# Altium footprint library LimeMicroAltiumLib.PcbLib: 876 footprints (part 24 of 57)
Each footprint in its own frame and in the unit in brackets; x right, y up, seen from the top. Pads: shape width x height; smd on the part's side, far side on the other; paste and mask are expansions set on the pad; w line width, h text height; cw(c..) or ccw(c..) is an arc to the next point about the centre after c.
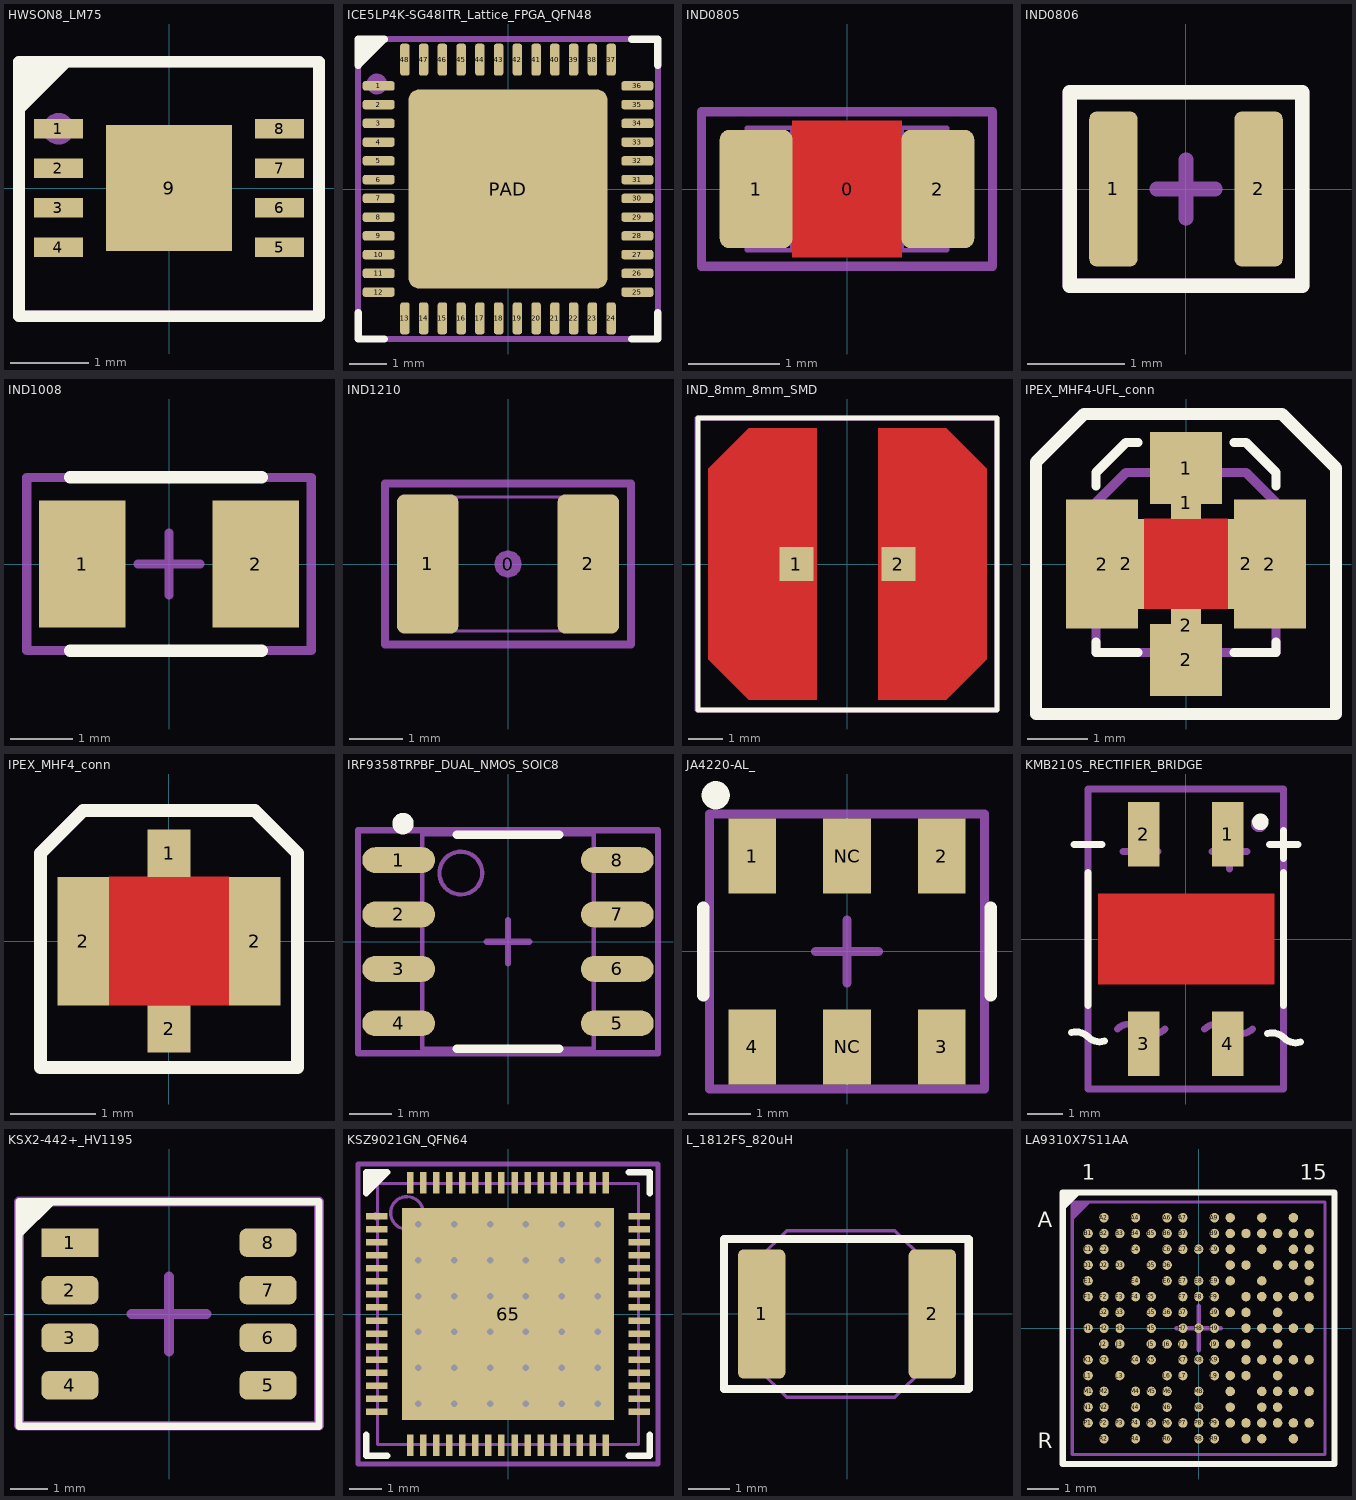
[diagram p23: the footprints below, top view; thin cyan lines are the x and y axes]

## HWSON8_LM75 [mm]
pads (9):
  rect 0.625x0.25 smd mask+0.05: 1(-1.4,0.75) 2(-1.4,0.25) 3(-1.4,-0.25) 4(-1.4,-0.75) 5(1.4,-0.75) 6(1.4,-0.25) 7(1.4,0.25) 8(1.4,0.75)
  rect 1.6x1.6 smd mask+0.05: 9(0,0)
Top Overlay:
  region: -1.9,1.075 -1.9,1.6 -1.375,1.6
  lines w0.15: -1.875,1.025 -1.325,1.575 ; -1.9,-1.625 -1.9,1.6 1.9,1.6 1.9,-1.625 -1.9,-1.625
Mechanical 15:
  circle w0.2: c-1.4,0.75 r0.1
  lines w0.15: -0.3,0 0.3,0 ; 0,-0.3 0,0.3 ; -1.9,-1.625 -1.9,1.6 1.9,1.6 1.9,-1.625 -1.9,-1.625
  text ".Designator" at 0,0 h0.55
3D body "User Library-DFN-8.step": height 0.8, standoff 0, extent -1.51,-1.5 1.51,1.5

## ICE5LP4K-SG48ITR_Lattice_FPGA_QFN48 [mm]
pads (49):
  rrect50% 0.85x0.25 smd mask+0.05: 1(-3.45,2.75) 2(-3.45,2.25) 3(-3.45,1.75) 4(-3.45,1.25) 5(-3.45,0.75) 6(-3.45,0.25) 7(-3.45,-0.25) 8(-3.45,-0.75) 9(-3.45,-1.25) 10(-3.45,-1.75) 11(-3.45,-2.25) 12(-3.45,-2.75) 25(3.45,-2.75) 26(3.45,-2.25) 27(3.45,-1.75) 28(3.45,-1.25) 29(3.45,-0.75) 30(3.45,-0.25) 31(3.45,0.25) 32(3.45,0.75) 33(3.45,1.25) 34(3.45,1.75) 35(3.45,2.25) 36(3.45,2.75)
  rrect50% 0.25x0.85 smd mask+0.05: 13(-2.75,-3.45) 14(-2.25,-3.45) 15(-1.75,-3.45) 16(-1.25,-3.45) 17(-0.75,-3.45) 18(-0.25,-3.45) 19(0.25,-3.45) 20(0.75,-3.45) 21(1.25,-3.45) 22(1.75,-3.45) 23(2.25,-3.45) 24(2.75,-3.45) 37(2.75,3.45) 38(2.25,3.45) 39(1.75,3.45) 40(1.25,3.45) 41(0.75,3.45) 42(0.25,3.45) 43(-0.25,3.45) 44(-0.75,3.45) 45(-1.25,3.45) 46(-1.75,3.45) 47(-2.25,3.45) 48(-2.75,3.45)
  rrect10% 5.3x5.3 smd mask+0.05: PAD(0,0)
Top Overlay:
  region: -4,3.3 -3.3,4 -4,4
  lines w0.2: -4,-3.3 -4,-4 -3.3,-4 ; 3.3,-4 4,-4 4,-3.3 ; 3.3,4 4,4 4,3.3 ; -4,3.3 -3.3,4 -4,4 -4,3.3
Mechanical 15:
  circle w0.35: c-3.5,2.8 r0.1
  lines w0.15: -0.5,0 0.5,0 ; 0,-0.5 0,0.5 ; -4,-4 -4,4 4,4 4,-4 -4,-4
  text ".Designator" at 0,0 h0.55
3D body "ALSRobot-QFN48 7x7.step": height 0.78, standoff -0.02, extent -3.51,-3.51 3.51,3.51

## IND0805 [mm] "Chip Inductor, Body 2.0x1.25mm, 0805, IPC Medium Density"
height 0.7
pads (3):
  round 0.254 on Mech15: 0(0,0)
  rrect25% 0.8x1.3 smd: 1(-1,0) 2(1,0)
Top Layer:
  pour cut-out: -0.6,0.75 0.6,0.75 0.6,-0.75 -0.6,-0.75
Mechanical 13:
  lines w0.05: 0.6,-0.674 -0.6,-0.674 ; -0.6,-0.675 -0.6,0.675 -1.1,0.675 -1.1,-0.675 -0.6,-0.675 ; -0.6,-0.674 0.6,-0.674 ; 0.6,-0.675 0.6,0.675 ; 0.6,-0.675 1.1,-0.675 1.1,0.675 0.6,0.675 ; 0.6,0.674 -0.6,0.674 0.6,0.674
Mechanical 15:
  lines w0.1: -1.6,-0.85 1.6,-0.85 1.6,0.85 -1.6,0.85 -1.6,-0.85
  text ".Designator" at 0,0 h0.7
3D body "RES 0805 (2012 metric).STEP": height 0.69, standoff -0.01, extent -1.1,-0.675 1.1,0.675

## IND0806 [mm]
pads (2):
  rrect30% 0.5x1.6 smd mask+0.05: 1(-0.75,0) 2(0.75,0)
Top Overlay:
  lines w0.15: -1.2,-1 1.2,-1 1.2,1 -1.2,1 -1.2,-1
Mechanical 15:
  lines w0.15: -0.3,0 0,0 ; 0,-0.3 0,0 ; 0,0.3 0,0 ; 0.3,0 0,0 ; -1.2,-1 1.2,-1 1.2,1 -1.2,1 -1.2,-1
  text ".Designator" at 0,0 h0.55
3D body "vls201610hbx-1.step": height 0.99, standoff -0.01, extent -1,-0.8 1,0.8

## IND1008 [mm] "1008 package inductor"
pads (2):
  rect 1.4x2.05 smd mask+0.05: 1(-1.4,0) 2(1.4,0)
Top Overlay:
  lines w0.2: -1.6,-1.4 1.5,-1.4 ; -1.6,1.4 1.5,1.4
Mechanical 15:
  lines w0.15: -0.5,0 0.5,0 ; 0,-0.5 0,0.5 ; -2.3,-1.4 -2.3,1.4 2.3,1.4 2.3,-1.4 -2.3,-1.4
  text ".Designator" at 0,0 h0.55
3D body "User Library-INDM2520X190N.step": height 1.8, standoff 0, extent -1.25,-1 1.25,1

## IND1210 [mm] "Chip Inductor, Body 3.2x2.5mm, 1210, IPC Medium Density"
pads (3):
  round 0.508 on Mech15: 0(0,0)
  rrect25% 1.15x2.6 smd: 1(-1.5,0) 2(1.5,0)
Mechanical 13:
  lines w0.05: -1.2,-1.25 1.2,-1.25 ; -1.2,-1.25 -1.6,-1.25 -1.6,1.25 -1.2,1.25 ; -1.2,-1.25 -1.2,1.25 ; -1.2,1.25 1.2,1.25 ; 1.2,-1.25 1.6,-1.25 1.6,1.25 1.2,1.25 ; 1.2,-1.25 1.2,1.25
Mechanical 15:
  lines w0.15: -2.3,-1.5 -2.3,1.5 2.3,1.5 2.3,-1.5 -2.3,-1.5
  text ".Designator" at -1.145,0.45 h0.55
3D body "User Library-CAPC3225X13.step": height 1.29, standoff -0.01, extent -1.6,-1.25 1.6,1.25

## IND_8mm_8mm_SMD [mm]
pads (2):
  rect 1x1 smd: 1(-1.5,0) 2(1.5,0)
Top Layer:
  region: 0.9,4 0.9,-4 2.9,-4 4.1,-2.8 4.1,2.8 2.9,4
  region: -0.9,4 -0.9,-4 -2.9,-4 -4.1,-2.8 -4.1,2.8 -2.9,4
Top Overlay:
  lines w0.15: -4.4,-4.3 4.4,-4.3 4.4,4.3 -4.4,4.3 -4.4,-4.3
Top Paste:
  region: -0.9,-4 -0.9,4 -2.9,4 -4.1,2.8 -4.1,-2.8 -2.9,-4
  region: 0.9,-4 0.9,4 2.9,4 4.1,2.8 4.1,-2.8 2.9,-4
Mechanical 15:
  lines w0.15: -4.425,-4.3 -4.425,4.3 4.4,4.3 4.4,-4.3 -4.425,-4.3
  text ".Designator" at 0,0 h0.55
  text "No polarity" at -3.5,-3.1 h0.55
3D body "52617.stp": height 2.18, standoff -0.1, extent -3.538,-3.37 3.538,3.3

## IPEX_MHF4-UFL_conn [mm] "X.FL-R-SMT-1(02)"
pads (8):
  rect 1.2x1.2 smd mask+0.05: 1(0,1.6) 2(0,-1.6)
  rect 0.5x0.55 smd mask+0.05: 1(0,1.025) 2(0,-1.025)
  rect 1.2x2.15 smd mask+0.05: 2(-1.4,0) 2(1.4,0)
  rect 0.6x1.5 smd mask+0.05: 2(-1,0) 2(1,0)
Top Layer:
  pour cut-out: -0.7,-0.75 -0.7,0.75 0.7,0.75 0.7,-0.75
Top Overlay:
  lines w0.15: -1.5,-1.3 -1.5,-1.475 -0.8,-1.475 ; -1.5,1.3 -1.5,1.525 -1,2.025 -0.8,2.025 ; 0.8,-1.475 1.5,-1.475 1.5,-1.3 ; 0.8,2.025 1,2.025 1.5,1.525 1.5,1.3
  lines w0.2: -2.5,-2.5 -2.5,1.7 -1.7,2.5 1.6,2.5 2.5,1.6 2.5,-2.5 -2.5,-2.5
Mechanical 15:
  lines w0.15: -0.5,0 0.5,0 ; 0,-0.5 0,0.5 ; -2.5,-2.5 2.5,-2.5 2.5,1.6 1.6,2.5 -1.7,2.5 -2.5,1.7 -2.5,-2.5 ; -1.5,-1.475 -1.5,1.025 -1,1.525 1,1.525 1.5,1.025 1.5,-1.475 -1.5,-1.475
  text "GND" at 1.175,-0.4 h0.3
  text "GND" at -0.35,-1.175 h0.3
  text "GND" at -0.85,-0.375 h0.3
  text "in" at -0.25,0.875 h0.3
  text ".designator" at 0,0 h0.55
3D body "X.FL-R-SMT-1.stp": height 0.56, standoff 0, extent -1,-0.975 1,1.025

## IPEX_MHF4_conn [mm] "X.FL-R-SMT-1(02)"
pads (4):
  rect 0.5x0.55 smd mask+0.05: 1(0,1.025) 2(0,-1.025)
  rect 0.6x1.5 smd mask+0.05: 2(-1,0) 2(1,0)
Top Layer:
  pour cut-out: -0.7,-0.75 -0.7,0.75 0.7,0.75 0.7,-0.75
Top Overlay:
  lines w0.15: -1.5,-1.475 1.5,-1.475 1.5,1.025 1,1.525 -1,1.525 -1.5,1.025 -1.5,-1.475
Mechanical 15:
  lines w0.15: -0.5,0 0.5,0 ; 0,-0.5 0,0.5 ; -1.5,-1.475 1.5,-1.475 1.5,1.025 1,1.525 -1,1.525 -1.5,1.025 -1.5,-1.475
  text ".designator" at 0,0 h0.55
  text "in" at -0.25,0.875 h0.3
  text "GND" at -0.85,-0.375 h0.3
  text "GND" at -0.35,-1.175 h0.3
  text "GND" at 1.175,-0.4 h0.3
3D body "X.FL-R-SMT-1.stp": height 0.56, standoff 0, extent -1,-0.975 1,1.025

## IRF9358TRPBF_DUAL_NMOS_SOIC8 [mm] "8-Pin Small Outline Integrated Circuit 1.27 mm Pitch"
height 1.55
pads (8):
  oval 1.7x0.6 smd mask+0.05: 1(-2.55,1.905) 2(-2.55,0.635) 3(-2.55,-0.635) 4(-2.55,-1.905) 5(2.55,-1.905) 6(2.55,-0.635) 7(2.55,0.635) 8(2.55,1.905)
Top Overlay:
  circle w0.25: c-2.45,2.755 r0.125
  lines w0.2: -1.2,-2.5 1.2,-2.5 ; -1.2,2.5 1.2,2.5
Mechanical 13:
  circle w0.1: c-1.1,1.6 r0.5
  lines w0.1: -2,-2.5 2,-2.5 2,2.5 -2,2.5 -2,-2.5
Mechanical 15:
  circle w0.35: c-2.6,1.9 r0.1
  lines w0.15: -0.5,0 0.5,0 ; 0,-0.5 0,0.5 ; -3.5,-2.6 3.5,-2.6 3.5,2.6 -3.5,2.6 -3.5,-2.6
  text ".Designator" at 0,0 h0.55
3D body "SOIC-8.STEP": height 1.75, standoff 0, extent -3,-2.45 3,2.45

## JA4220-AL_ [mm]
pads (6):
  rect 0.76x1.2 smd mask+0.05: 1(-1.52,1.525) 2(1.52,1.525) 3(1.52,-1.525) 4(-1.52,-1.525) NC(0,-1.525) NC(0,1.525)
Top Overlay:
  circle w0.25: c-2.1,2.5 r0.1
  lines w0.2: -2.3,-0.7 -2.3,0.7 ; 2.3,-0.7 2.3,0.7
Mechanical 15:
  circle w0.25: c-1.5,1.6 r0.1
  lines w0.15: -0.5,0 0.5,0 ; 0,-0.5 0,0.5 ; -2.2,-2.2 2.2,-2.2 2.2,2.2 -2.2,2.2 -2.2,-2.2
  text ".Designator" at 0,0 h0.55
3D body "Coilcraft-JA4220-AL.step": height 3.03, standoff -0.02, extent -2.225,-2.095 2.225,2.095

## KMB210S_RECTIFIER_BRIDGE [mm]
pads (4):
  rect 0.9x1.84 smd mask+0.05: 1(1.2,3) 2(-1.2,3) 3(-1.2,-3) 4(1.2,-3)
Top Layer:
  pour cut-out: -2.5,-1.3 -2.5,1.3 2.525,1.3 2.525,-1.3
Top Overlay:
  circle w0.254: c2.134,3.353 r0.108
  lines w0.2: -3.277,-2.678 cw(c-3.141,-3.141) -2.8,-2.8 ccw(c-2.459,-2.459) -2.323,-2.922 ; -3.2,2.7 -2.392,2.7 ; -2.8,-1.9 -2.8,0 -2.8,1.9 ; 2.335,-2.707 cw(c2.471,-3.171) 2.812,-2.829 ccw(c3.154,-2.488) 3.289,-2.951 ; 2.4,2.7 3.208,2.7 ; 2.8,-1.9 2.8,0 2.8,1.9 ; 2.8,2.3 2.8,3.108
Mechanical 15:
  circle w0.2: c2.1,3.3 r0.141
  lines w0.2: -1.958,-2.575 cw(c-1.616,-2.916) -1.616,-2.434 cw(c-1.616,-2.916) -1.275,-2.575 ccw(c-0.934,-2.234) -0.934,-2.716 ccw(c-0.934,-2.234) -0.592,-2.575 ; -1.8,2.5 -0.8,2.5 ; -1,0 1,0 ; 0,-1 0,1 ; 0.542,-2.575 cw(c0.884,-2.916) 0.884,-2.434 cw(c0.884,-2.916) 1.225,-2.575 ccw(c1.566,-2.234) 1.566,-2.716 ccw(c1.566,-2.234) 1.908,-2.575 ; 0.75,2.5 1.75,2.5 ; 1.25,2 1.25,3 ; -2.8,-4.293 2.8,-4.293 2.8,4.293 -2.8,4.293 -2.8,-4.293
  text ".Designator" at 0,0 h0.55
3D body "MB10S--3DModel-STEP-56544.STEP": height 2.71, standoff -0.19, extent -2.312,-3.35 2.413,3.35

## KSX2-442+_HV1195 [mm]
pads (8):
  rect 1.52x0.76 smd: 1(-2.645,1.905)
  rrect50% 1.52x0.76 smd: 2(-2.645,0.635) 3(-2.645,-0.635) 4(-2.645,-1.905) 5(2.645,-1.905) 6(2.645,-0.635) 7(2.645,0.635) 8(2.645,1.905)
Top Overlay:
  region: -4,2 -3,3 -4,3
  lines w0.2: -4,-3 4,-3 4,3 -4,3 -4,-3
Mechanical 15:
  lines w0.254: -2.521,1.893 cw(c-2.6,1.9) -2.521,1.9 ; -1,0 0,0 ; 0,-1 0,0 ; 0,1 0,0 ; 1,0 0,0 ; -4,-2.975 4,-2.975 4,3 -4,3 -4,-2.975
  text ".Designator" at 0,0 h0.55
3D body: height 2.22, standoff 0, extent -1.448,1.05 -1.05,1.45
3D body: height 2.21, standoff 0, extent -2.54,-2.185 2.54,2.2

## KSZ9021GN_QFN64 [mm] "QFN, 64-Leads, Body 8,00x8,00mm, Pitch 0,40mm, Thermal Pad 6,50x6,50mm, IPC Medium Density"
height 0.85
pads (65):
  rect 0.65x0.2 smd mask+0.05: 1(-4.025,3) 2(-4.025,2.6) 3(-4.025,2.2) 4(-4.025,1.8) 5(-4.025,1.4) 6(-4.025,1) 7(-4.025,0.6) 8(-4.025,0.2) 9(-4.025,-0.2) 10(-4.025,-0.6) 11(-4.025,-1) 12(-4.025,-1.4) 13(-4.025,-1.8) 14(-4.025,-2.2) 15(-4.025,-2.6) 16(-4.025,-3) 33(4.025,-3) 34(4.025,-2.6) 35(4.025,-2.2) 36(4.025,-1.8) 37(4.025,-1.4) 38(4.025,-1) 39(4.025,-0.6) 40(4.025,-0.2) 41(4.025,0.2) 42(4.025,0.6) 43(4.025,1) 44(4.025,1.4) 45(4.025,1.8) 46(4.025,2.2) 47(4.025,2.6) 48(4.025,3)
  rect 0.2x0.65 smd mask+0.05: 17(-3,-4.025) 18(-2.6,-4.025) 19(-2.2,-4.025) 20(-1.8,-4.025) 21(-1.4,-4.025) 22(-1,-4.025) 23(-0.6,-4.025) 24(-0.2,-4.025) 25(0.2,-4.025) 26(0.6,-4.025) 27(1,-4.025) 28(1.4,-4.025) 29(1.8,-4.025) 30(2.2,-4.025) 31(2.6,-4.025) 32(3,-4.025) 49(3,4.025) 50(2.6,4.025) 51(2.2,4.025) 52(1.8,4.025) 53(1.4,4.025) 54(1,4.025) 55(0.6,4.025) 56(0.2,4.025) 57(-0.2,4.025) 58(-0.6,4.025) 59(-1,4.025) 60(-1.4,4.025) 61(-1.8,4.025) 62(-2.2,4.025) 63(-2.6,4.025) 64(-3,4.025)
  rect 6.5x6.5 smd mask+0.05: 65(0,0)
via 2.75,-2.75 diameter 0.5 hole 0.2
via 1.65,-2.75 diameter 0.5 hole 0.2
via 0.55,-2.75 diameter 0.5 hole 0.2
via -0.55,-2.75 diameter 0.5 hole 0.2
via -1.65,-2.75 diameter 0.5 hole 0.2
via -2.75,-2.75 diameter 0.5 hole 0.2
via 2.75,-1.65 diameter 0.5 hole 0.2
via 1.65,-1.65 diameter 0.5 hole 0.2
via 0.55,-1.65 diameter 0.5 hole 0.2
via -0.55,-1.65 diameter 0.5 hole 0.2
via -1.65,-1.65 diameter 0.5 hole 0.2
via -2.75,-1.65 diameter 0.5 hole 0.2
via 2.75,-0.55 diameter 0.5 hole 0.2
via 1.65,-0.55 diameter 0.5 hole 0.2
via 0.55,-0.55 diameter 0.5 hole 0.2
via -0.55,-0.55 diameter 0.5 hole 0.2
via -1.65,-0.55 diameter 0.5 hole 0.2
via -2.75,-0.55 diameter 0.5 hole 0.2
via 2.75,0.55 diameter 0.5 hole 0.2
via 1.65,0.55 diameter 0.5 hole 0.2
via 0.55,0.55 diameter 0.5 hole 0.2
via -0.55,0.55 diameter 0.5 hole 0.2
via -1.65,0.55 diameter 0.5 hole 0.2
via -2.75,0.55 diameter 0.5 hole 0.2
via 2.75,1.65 diameter 0.5 hole 0.2
via 1.65,1.65 diameter 0.5 hole 0.2
via 0.55,1.65 diameter 0.5 hole 0.2
via -0.55,1.65 diameter 0.5 hole 0.2
via -1.65,1.65 diameter 0.5 hole 0.2
via -2.75,1.65 diameter 0.5 hole 0.2
via 2.75,2.75 diameter 0.5 hole 0.2
via 1.65,2.75 diameter 0.5 hole 0.2
via 0.55,2.75 diameter 0.5 hole 0.2
via -0.55,2.75 diameter 0.5 hole 0.2
via -1.65,2.75 diameter 0.5 hole 0.2
via -2.75,2.75 diameter 0.5 hole 0.2
Top Overlay:
  region: -4.3,3.75
  region: -4.35,3.7 -4.35,4.35 -3.7,4.35
  lines w0.2: -4.35,-3.7 -4.35,-4.35 -3.7,-4.35 ; 3.7,-4.35 4.35,-4.35 4.35,-3.7 ; 3.7,4.35 4.35,4.35 4.35,3.7 ; -4.35,3.7 -4.35,4.35 -3.7,4.35 -4.35,3.7
Mechanical 13:
  circle w0.1: c-3.1,3.1 r0.5
  lines w0.1: -4,-4 4,-4 4,4 -4,4 -4,-4
Mechanical 15:
  circle w0.2: c-4.025,3 r0.035
  lines w0.15: -0.5,0 0.5,0 ; 0,-0.5 0,0.5 ; -4.6,-4.6 4.6,-4.6 4.6,4.6 -4.6,4.6 -4.6,-4.6
  text ".Designator" at 0,0 h0.55
3D body: height 0.85, standoff 0.01, extent -4,-4 4,4

## L_1812FS_820uH [mm] "Chip Resistor, Body 2.0x1.2mm, 0805, IPC Medium Density"
height 0.7
pads (2):
  rrect25% 1.14x3.1 smd: 1(-2.05,0) 2(2.05,0)
Top Overlay:
  lines w0.2: -2.95,-1.8 2.925,-1.8 2.925,1.8 -2.95,1.8 -2.95,-1.8
Mechanical 13:
  lines w0.076: -2.125,-1.325 -1.45,-2 1.15,-2 1.875,-1.275 1.875,1.275 1.15,2 -1.45,2 -2.125,1.325 -2.125,-1.325
Mechanical 15:
  lines w0.15: -2.95,-1.8 -2.95,1.8 2.9,1.8 2.9,-1.8 -2.95,-1.8
  text ".Designator" at 0,0 h0.55
3D body "Inductor Coilcraft LPS4018.STEP": height 1.79, standoff -0.01, extent -2.125,-2 1.875,2

## LA9310X7S11AA [mm] "BGA, 81-Leads, Body 8,00x8,00mmx0,45mm, Pitch 0,50mm"
height 0.45
pads (157):
  round 0.3 smd mask+0.05: A2(-3,3.5) A4(-2,3.5) A6(-1,3.5) A7(-0.5,3.5) A9(0.5,3.5) A10(1,3.5) A12(2,3.5) A14(3,3.5) B1(-3.5,3) B2(-3,3) B3(-2.5,3) B4(-2,3) B5(-1.5,3) B6(-1,3) B7(-0.5,3) B9(0.5,3) B10(1,3) B11(1.5,3) B12(2,3) B13(2.5,3) B14(3,3) B15(3.5,3) C1(-3.5,2.5) C2(-3,2.5) C4(-2,2.5) C6(-1,2.5) C7(-0.5,2.5) C8(0,2.5) C9(0.5,2.5) C10(1,2.5) C12(2,2.5) C14(3,2.5) C15(3.5,2.5) D1(-3.5,2) D2(-3,2) D3(-2.5,2) D5(-1.5,2) D6(-1,2) D10(1,2) D11(1.5,2) D13(2.5,2) D14(3,2) D15(3.5,2) E1(-3.5,1.5) E4(-2,1.5) E6(-1,1.5) E7(-0.5,1.5) E8(0,1.5) E9(0.5,1.5) E10(1,1.5) E12(2,1.5) E15(3.5,1.5) F1(-3.5,1) F2(-3,1) F3(-2.5,1) F4(-2,1) F5(-1.5,1) F7(-0.5,1) F8(0,1) F9(0.5,1) F11(1.5,1) F12(2,1) F13(2.5,1) F14(3,1) F15(3.5,1) G2(-3,0.5) G3(-2.5,0.5) G5(-1.5,0.5) G6(-1,0.5) G7(-0.5,0.5) G9(0.5,0.5) G10(1,0.5) G11(1.5,0.5) G13(2.5,0.5) H1(-3.5,0) H2(-3,0) H3(-2.5,0) H5(-1.5,0) H7(-0.5,0) H8(0,0) H9(0.5,0) H11(1.5,0) H12(2,0) H13(2.5,0) H14(3,0) H15(3.5,0) J2(-3,-0.5) J3(-2.5,-0.5) J5(-1.5,-0.5) J6(-1,-0.5) J7(-0.5,-0.5) J9(0.5,-0.5) J10(1,-0.5) J11(1.5,-0.5) J13(2.5,-0.5) K1(-3.5,-1) K2(-3,-1) K4(-2,-1) K5(-1.5,-1) K7(-0.5,-1) K8(0,-1) K9(0.5,-1) K11(1.5,-1) K12(2,-1) K13(2.5,-1) K14(3,-1) K15(3.5,-1) L1(-3.5,-1.5) L3(-2.5,-1.5) L6(-1,-1.5) L7(-0.5,-1.5) L9(0.5,-1.5) L10(1,-1.5) L11(1.5,-1.5) L13(2.5,-1.5) M1(-3.5,-2) M2(-3,-2) M4(-2,-2) M5(-1.5,-2) M6(-1,-2) M8(0,-2) M10(1,-2) M12(2,-2) M13(2.5,-2) M14(3,-2) M15(3.5,-2) N1(-3.5,-2.5) N2(-3,-2.5) N4(-2,-2.5) N6(-1,-2.5) N8(0,-2.5) N10(1,-2.5) N12(2,-2.5) N13(2.5,-2.5) P1(-3.5,-3) P2(-3,-3) P3(-2.5,-3) P4(-2,-3) P5(-1.5,-3) P6(-1,-3) P7(-0.5,-3) P8(0,-3) P9(0.5,-3) P10(1,-3) P11(1.5,-3) P12(2,-3) P13(2.5,-3) P14(3,-3) P15(3.5,-3) R2(-3,-3.5) R4(-2,-3.5) R6(-1,-3.5) R8(0,-3.5) R9(0.5,-3.5) R11(1.5,-3.5) R12(2,-3.5) R14(3,-3.5)
Top Overlay:
  region: -3.7,4.3 -4.3,3.7 -4.3,4.3
  lines w0.2: -4.3,-4.3 4.3,-4.3 4.3,4.3 -4.3,4.3 -4.3,-4.3
  text "R" at -5.1,-3.8 h0.5
  text "A" at -5.1,3.2 h0.5
  text "1" at -3.7,4.7 h0.5
  text "15" at 3.2,4.7 h0.5
Mechanical 15:
  region: -3.4,4 -4,3.4 -4,4
  lines w0.1: -4,-4 -4,4 4,4 4,-4 -4,-4
  lines w0.15: -0.7,0 0,0 ; 0,-0.7 0,0 ; 0,0.7 0,0 ; 0.7,0 0,0
  text "12" at 1.7,5.5 h0.5
  text "8" at -0.2,5.5 h0.5
  text "4" at -2.2,5.5 h0.5
  text "15" at 3.2,4.7 h0.5
  text "13" at 2.1,4.7 h0.5
  text "14" at 2.8,5.5 h0.5
  text "10" at 0.6,5.5 h0.5
  text "6" at -1.2,5.5 h0.5
  text "2" at -3.2,5.5 h0.5
  text "11" at 1.2,4.7 h0.5
  text "9" at 0.3,4.7 h0.5
  text "7" at -0.7,4.7 h0.5
  text "5" at -1.7,4.7 h0.5
  text "3" at -2.7,4.7 h0.5
  text "1" at -3.7,4.7 h0.5
  text "D" at -5.8,1.8 h0.5
  text "H" at -5.8,-0.2 h0.5
  text "M" at -5.8,-2.2 h0.5
  text "A" at -5.1,3.2 h0.5
  text "B" at -5.8,2.8 h0.5
  text "C" at -5.1,2.2 h0.5
  text "G" at -5.1,0.2 h0.5
  text "F" at -5.8,0.8 h0.5
  text "E" at -5.1,1.2 h0.5
  text "L" at -5.1,-1.8 h0.5
  text "K" at -5.8,-1.2 h0.5
  text "J" at -5.1,-0.8 h0.5
  text "N" at -5.1,-2.8 h0.5
  text "P" at -5.8,-3.2 h0.5
  text "R" at -5.1,-3.8 h0.5
  text ".Designator" at 0,0 h0.55
3D body "LA9310X7S11AA.step": height 0.45, standoff 0, extent -4,-4 4,4